# Altium integrated library Protection.IntLib: 3 symbols
Pins are listed as number, name and electrical type; pins without a type are passive.

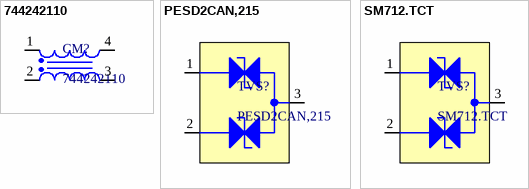
[diagram p0: symbols 744242110 to SM712.TCT]

## 744242110
designator CM?
Data Line Filter, 2 Function(s), 80V, 0.3A, 4 Pin(s); Manufacturer: Wurth Electronics; Purpose Of Usage: BASIC; Manufacturer Part Number: 744242110; RoHS: Yes; Category: PROTECTION; Local Supplier: Wurth Electronics; Mount: SMD; Stock ID: ??; Sub-Category: FILTER-COMMON MODE; Supplier 1: Digikey; Supplier Part Number 1: 732-1681-1-ND
footprint WE-SLM_L6W3.3H3.3 (SMD Inductor, 4-Leads, Body 5x3.3mm)
pins: 1, 2, 3, 4

## PESD2CAN,215
designator TVS?
PESD Series 2 Channel Bi-Directional CAN Bus ESD Protection Diode - SOT-23; Manufacturer: Nexperia USA; Purpose Of Usage: BASIC; Direction: Bidirectional; Manufacturer Part Number: PESD2CAN,215; RoHS: No; Category: PROTECTION; Case/Package: SOT-23; Local Supplier: GENERAL; Mount: SMD; Stock ID: ??; Sub-Category: TVS - BI DIRECTIONAL; Supplier Part Number 1: 1727-3891-2-ND; Supplier 1: Digikey
footprint WE-TVS_SOT23-3L (TVS Diode, package SOT23-3L)
pins: 1 I/O 1, 2 I/O 2, 3 GND

## SM712.TCT
designator TVS?
SM Series 12 V 400 W Asymmetrical TVS Diode for Extended Common-Mode - SOT-23; Manufacturer: Semtech; Direction: Bidirectional; Number of Elements: 2; Min Breakdown Voltage: 7.5V; Clamping Voltage: 26V; Peak Pulse Power: 400W; Leakage Current: 1uA; Peak Pulse Current: 17A; Working Voltage: 12V; Max Breakdown Voltage: 13.3V; ESD Protection: Yes; Max Reverse Leakage Current: 20uA; Number of Channels: 2NUMBER; Purpose Of Usage: BASIC; Manufacturer Part Number: SM712.TCT; RoHS: Yes; Category: PROTECTION; Mounting Technology: Surface Mount; Case/Package: SOT-23; Pins: 3; Min Operating Temperature: -55°C; Max Operating Temperature: 125°C; Number of Bidirectional Channels: 2; Power Dissipation: 400W; Polarity: Bidirectional; Max Power Dissipation: 400W; Breakdown Voltage: 13.3V; Voltage Rating (DC): 12V; Clamping Voltage-Max: 12V; Length: 2.9mm; Lead Free: Lead Free; Local Supplier: GENERAL; Mount: SMD; Power Rating: 400W; Price 10K: 0.5; Stock ID: ??; Sub-Category: TVS - BI DIRECTIONAL; Supplier 1: Digikey; Supplier Part Number 1: SM712CT-ND
footprint WE-TVS_SOT23-3L (TVS Diode, package SOT23-3L)
pins: 1 I/O 1, 2 I/O 2, 3 GND